# Altium footprint library WP710A10QBCD.PcbLib: 1 footprints
Each footprint in its own frame and in the unit in brackets; x right, y up, seen from the top. Pads: shape width x height; smd on the part's side, far side on the other; paste and mask are expansions set on the pad; w line width, h text height; cw(c..) or ccw(c..) is an arc to the next point about the centre after c.
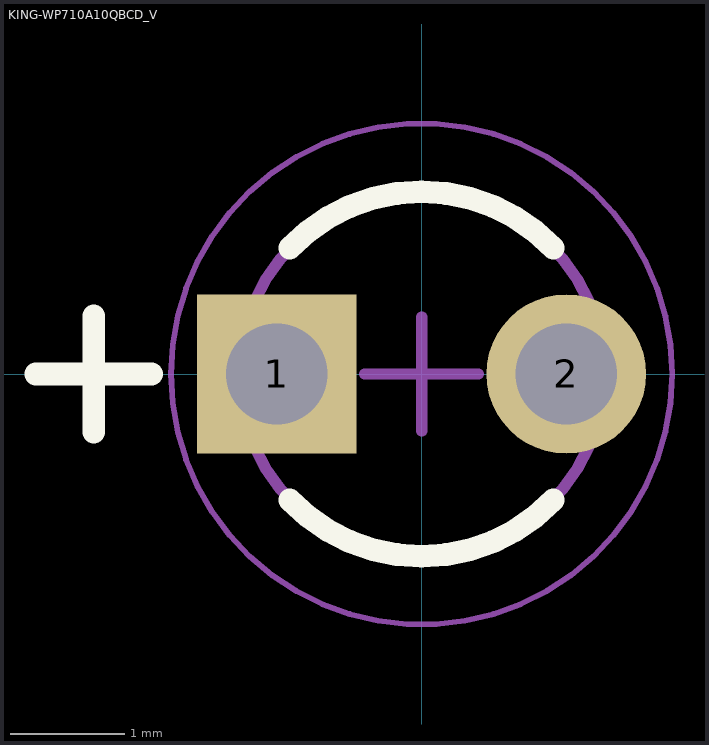
[diagram p0: the footprint, top view; thin cyan lines are the x and y axes]

## KING-WP710A10QBCD_V [mm] "THD, 2-Leads, Dia 3.2mm"
pads (2):
  rect 1.4x1.4 hole 0.889 paste-2539.97 mask+0.064: 1(-1.27,0)
  round 1.4 hole 0.889 paste-2539.97 mask+0.064: 2(1.27,0)
Top Overlay:
  lines w0.2: -3.386,0 -2.37,0 ; -2.878,-0.508 -2.878,-0.254 -2.878,0.254 -2.878,0.508 ; -1.157,-1.105 ccw(c0,0) 1.157,-1.105 ; -1.157,1.105 cw(c0,0) 1.157,1.105
Mechanical 13:
  circle w0.1: c0,0 r1.6
Mechanical 15:
  circle w0.05: c0,0 r2.2
  lines w0.1: -0.5,0 0.5,0 ; 0,-0.5 0,0.5